# Altium schematic symbol library 22035045.SchLib: 1 symbol
Pins are listed as number, name and electrical type; pins without a type are passive.

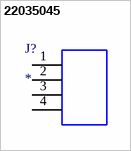
[diagram p0: symbol 22035045]

## 22035045
designator J?
2.50mm Pitch SPOXâ„¢ Wire-to-Board Header, Vertical, Shrouded, 4 Circuits, Tin (Sn) Plating; MF: Molex; MP: 22035045; SnapEDA_Link: https://www.snapeda.com/parts/22035045/Molex/view-part/?ref=snap; Package: None; Value: *; Check_prices: https://www.snapeda.com/parts/22035045/Molex/view-part/?ref=eda
footprint CONN_22035045_MOL
pins: 1, 2, 3, 4